# Altium schematic symbol library 2020-05-17_10-43-22.SchLib: 2 symbols
Pins are listed as number, name and electrical type; pins without a type are passive.

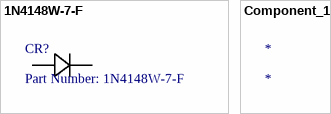
[diagram p0: symbols 1N4148W-7-F to Component_1]

## 1N4148W-7-F
designator CR?, comment Part Number: 1N4148W-7-F
No Description Available; Vendor: Diodes Inc; Built_By: EMA_Anthony; SourceLibrary: Diodes_Inc_2018-12-15; Type: DEV; Manufacturer_Part_Number: 1N4148W-7-F; Copyright: Copyright (C) 2016 Accelerated Designs. All rights reserved; RefDes: RefDes; Value: Value
footprint SOD123_DIO
pins: 1, 2

## Component_1
designator *